# Altium schematic symbol library GC9A01.SchLib: 1 symbol
Pins are listed as number, name and electrical type; pins without a type are passive.

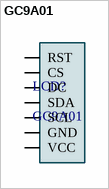
[diagram p0: symbol GC9A01]

## GC9A01
designator LCD?
TFT LCD
footprint GC9A01
pins: 1 RST, 2 CS, 3 DC, 4 SDA, 5 SCL, 6 GND, 7 VCC